# Altium schematic symbol library Lipo_discharger_new.SCHLIB: 12 symbols
Pins are listed as number, name and electrical type; pins without a type are passive.

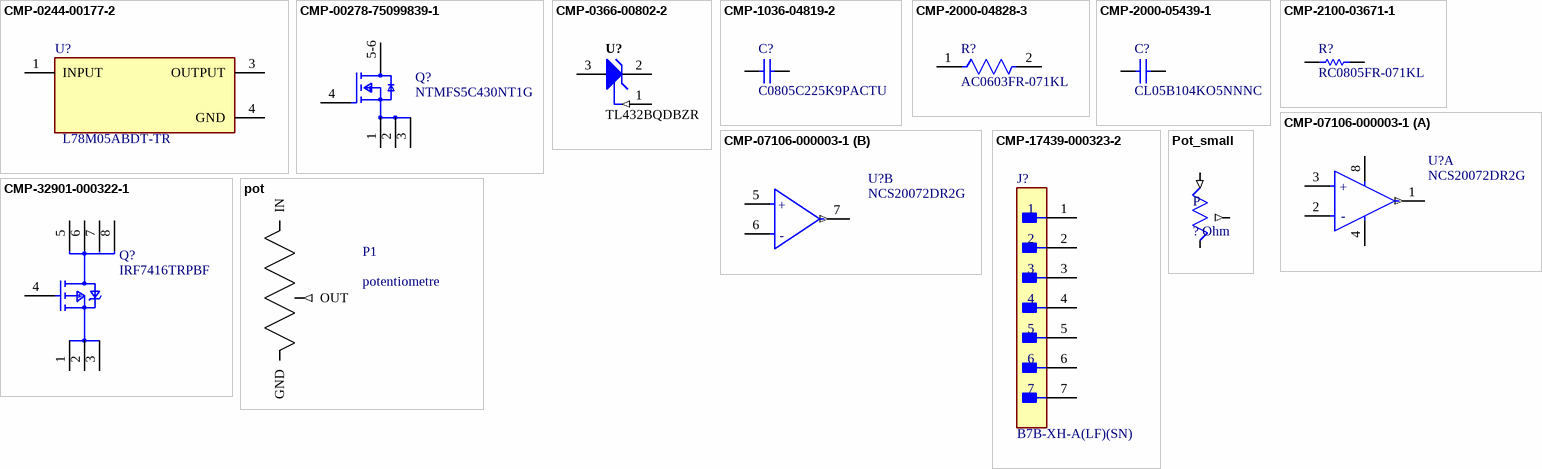
[diagram p0: symbols CMP-0244-00177-2 to Pot_small]

## CMP-0244-00177-2
designator U?, comment L78M05ABDT-TR
IC REG LINEAR 5V 500MA DPAK; Polarity: Positive; Accuracy: 2%; Max Input Voltage: 35V; Tolerance: 4%; Power Supply Rejection Ratio (PSRR): 62dB; Dropout Voltage: 2V; Output Type: Fixed; Number of Regulators: 1; Min Input Voltage: 10V; Quiescent Current: 6mA; Mount: Surface Mount; Min Operating Temperature: -40°C; Lead Free: Lead Free; Number of Pins: 3; Height: 2.4mm; Weight: 0.01lb; Width: 6.2mm; Packaging: Tape and Reel; Output Current: 500mA; Output Voltage: 5V; Case/Package: TO-252; REACH SVHC: No SVHC; Max Operating Temperature: 125°C; Nominal Output Voltage: 5V; Number of Outputs: 1; Min Output Voltage: 5V; Radiation Hardening: No; Length: 6.6mm; Max Output Current: 500mA; Contact Plating: Tin; Output Voltage Accuracy: 2%; Package Quantity: 1
footprint FP-L78M05ABDT-TR-MFG
pins: 1 INPUT (power), 3 OUTPUT (power), 4 GND (power)

## CMP-00278-75099839-1
designator Q?, comment NTMFS5C430NT1G
NTMFS5C430NT1G T6-D3F 40V Nfet/Reel Rohs Compliant: Yes; Manufacturer Lifecycle Status: ACTIVE; NexarPartId: 75099839; Drain to Source Resistance: 1.4mΩ; RoHS: Compliant; Lead Free: Lead Free; Schedule B: 8541290080, 8541290080; Lifecycle Status: Production
footprint FP-488AA-MFG (Single P-Channel Power MOSFET, -60 V, -100 A, 7.7 mΩ)
pins: 1 S, 2 S, 3 S, 4 G, 5-6 D

## CMP-0366-00802-2
designator U?, comment TL432BQDBZR
Adjustable Precision Shunt Regulator, 34 ppm / degC, 100 mA, -40 to 125 degC, 3-pin SOT-23 (DBZ), Green (RoHS & no Sb/Br); Manufacturer: Texas Instruments; VO Adj(Max)(V): 36; VO Adj(Min)(V): 2.495; Iout/Iz(Max)(mA): 100; Temp Coeff(Typ)(ppm/ degree C): 34; SubFamily: Shunt Voltage Reference; Initial Accuracy @ 25/deg C(%): 0.5; Rating: Catalog; Temp Coeff(Max)(ppm/ degree C): 92; Min Iz for Regulation(uA): 600; Mounting Technology: Surface Mount; DatasheetVersion: SLVS543M; ComponentLink3URL: http://www.ti.com/litv/pdf/mpds108a; Code_JEDEC: TO-236; ComponentLink3Description: Package Specification; ComponentLink1URL: http://www.ti.com/; PartNumber: TL432BQDBZR; Eco-Plan: Green (RoHS & no Sb/Br); PackageReference: DBZ0003A; ComponentLink2URL: http://www.ti.com/general/docs/lit/getliterature.tsp?genericPartNumber=TL432B&fileType=pdf; ComponentLink1Description: Manufacturer URL; PackageDescription: 3-Pin Plastic Small Outline, Body 2.92 x 1.3 mm, Pitch 0.95 mm; PackageVersion: 4203227/B; ComponentLink2Description: Datasheet
footprint DBZ0003A_N (SOT23, 3-Leads, Body 3.04x1.4mm, Pitch 0.95mm, IPC Medium Density)
footprint DBZ0003A_L (SOT23, 3-Leads, Body 3.04x1.4mm, Pitch 0.95mm, IPC High Density)
footprint DBZ0003A_M (SOT23, 3-Leads, Body 3.04x1.4mm, Pitch 0.95mm, IPC Low Density)
pins: 1 REF (in), 2 CATHODE, 3 ANODE

## CMP-1036-04819-2
designator C?, comment C0805C225K9PACTU
Manufacturer: Kemet; Part Number: C0805C225K9PACTU
footprint CAPC2013X145X50ML20T25 (Chip Capacitor, 2-Leads, Body 2.00x1.25mm, IPC Low Density)
footprint CAPC2013X145X50LL20T25 (Chip Capacitor, 2-Leads, Body 2.00x1.25mm, IPC High Density)
footprint CAPC2013X145X50NL20T25 (Chip Capacitor, 2-Leads, Body 2.00x1.25mm, IPC Medium Density)
pins: 1, 2
1 alternate drawing of the same symbol

## CMP-2000-04828-3
designator R?, comment AC0603FR-071KL
RES 1kΩ 1.00% 0.1W 0603; Voltage Rating: 50V; Power Rating: 100mW; Tolerance: 1%; Temperature Coefficient: 100ppm/°C; Resistance: 1kR; Depth: 0.8mm; Case/Package: 0603; Size Code: 0603; Case Code (Metric): 1608; Height: 0.022inch; Series: AC; Width: 0.031inch; Construction: Rectangular; Length: 0.063inch; Case Code (Imperial): 0603; Package Quantity: 1; RoHS Compliant: Yes; Features: Moisture Resistant; Resistor Type: Thick Film; Max Power Dissipation: 100mW; Packaging: Tape and Reel; Termination: SMD/SMT; Ratings: AEC-Q200; Max Operating Temperature: 155°C; Min Operating Temperature: -55°C; Military Standard: Not; Lead Free: Lead Free; Number of Terminations: 2
footprint FP-AC0603-IPC_B
footprint FP-AC0603-IPC_A
footprint FP-AC0603-MFG
footprint FP-AC0603-IPC_C
pins: 1, 2

## CMP-2000-05439-1
designator C?, comment CL05B104KO5NNNC
Chip Capacitor, 100 nF, +/- 10%, 16 V, -55 to 125 degC, 0402 (1005 Metric), RoHS, Tape and Reel; Manufacturer: Samsung Electro-Mechanics; Capacitance: 100000pF; Dielectric: X7R; Rated Voltage: 16V; Case Size/Dimension: 0402; Tolerance (%): ±10%; Manufacturer URL: http://www.samsungsem.com/global/index.jsp; Datasheet URL: https://datasheet.ciiva.com/29198/458718-da-01-en-vs-kondensator-0402-29198423.pdf; Datasheet Version: Nov-10
footprint CAPC1050X55X23ML05T13 (Chip Capacitor, 2-Leads, Body 1.05x0.55mm, IPC Low Density)
footprint CAPC1050X55X23NL05T13 (Chip Capacitor, 2-Leads, Body 1.05x0.55mm, IPC Medium Density)
footprint CAPC1050X55X23LL05T13 (Chip Capacitor, 2-Leads, Body 1.05x0.55mm, IPC High Density)
pins: 1, 2

## CMP-2100-03671-1
designator R?, comment RC0805FR-071KL
Chip Resistor, 1 KOhm, +/- 1%, 125 mW, -55 to 155 degC, 0805 (2012 Metric), RoHS, Tape and Reel; Manufacturer: Yageo; Temperature Coefficient: 100ppm/degreesC; Voltage Rating (DC): 150V; Max Power Dissipation: 125mW; Resistance: 1KOhm; Number of Pins: 2; Number of Terminations: 2; Datasheet URL: http://www.yageo.com/NewPortal/yageodocoutput?fileName=/pdf/R-Chip/PYu-RC_Group_51_RoHS_L_5.pdf; Length: 0.079inch; Package Description: 2-Pin Surface Mounted Device, Body 2 x 1.25 mm; Depth: 1.25mm; Height: 0.024inch; Military Standard: Not; Case/Package: 0805; Package Reference: 0805; RoHSCompliant: true; Lead Free: LeadFree; Packaging: TapeandReel; Package Quantity: 1; Datasheet Version: Rev. 5, 10/2016; Tolerance: 1%; Min Operating Temperature: -55degC; Voltage Rating: 150V; Composition: ThickFilm; Case Code (Imperial): 0805; Power Rating: 125mW; Width: 0.049inch; Case Code (Metric): 2012; Manufacturer URL: http://www.yageo.com/; Max Operating Temperature: 155degC; REACH SVHC: Unknown; Termination: SMD/SMT
footprint RESC2013X60X35ML10T20 (Chip Resistor, 2-Leads, Body 2.1x1.35mm, IPC Low Density)
footprint RESC2013X60X35NL10T20 (Chip Resistor, 2-Leads, Body 2.1x1.35mm, IPC Medium Density)
footprint RESC2013X60X35LL10T20 (Chip Resistor, 2-Leads, Body 2.00x1.25mm, IPC High Density)
pins: 1, 2

## CMP-07106-000003-1
designator U?, comment NCS20072DR2G
IC OPAMP 3MHZ RRO DUAL 8SOIC; Manufacturer: ON Semiconductor; Standoff Height: 0.1mm; Voltage Gain: 118-120dB; Max Junction Temp: +150°C; Min Supply Voltage: 2.7V; Max Dual Supply Voltage: 18V; Output Current Per Channel: 465uA; Input Bias Current: 0.000005uA; Input Offset Voltage: 1.3mV; Min Dual Supply Voltage: 1.35V; Max Supply Voltage: 36V; Nominal Supply Current: 405-465uA; Number Of Channels: 2; Gain Bandwidth: 3MHz; Temperature: -40°C to +125°C; Temperature Range High: +125°C; Ambient Temperature Range Low: -40°C; Device Class L1: Integrated Circuits (ICs); ComponentLink2Description: Datasheet; Package: 751-07; Lead Free: Yes; ComponentLink2URL: http://www.onsemi.com/pub/Collateral/NCS20071-D.PDF; Mouser Description: Operational Amplifiers - Op Amps R2R DUAL AMPLIFIER; Manufacturer Part Number: NCS20072DR2G; Octopart: https://octopart.com/ncs20072dr2g-on+semiconductor-56676507; Automotive: No; Device Class L3: Amplifiers - Op Amps; Device Class L2: Linear ICs; Category: IC; Bandwidth: 3MHz; Footprint Url: http://www.onsemi.com/pub/Collateral/751-07.PDF; RoHS: TRUE; Temperature Range Low: -40°C; Ambient Temperature Range High: +125°C; Height: 1.75mm; Digikey Description: IC OPAMP 3MHZ RRO DUAL 8SOIC
footprint FP-751-07-MFG
footprint FP-751-07-IPC_C
footprint FP-751-07-IPC_B
footprint FP-751-07-IPC_A
part A pins: 1 OUT 1 (out), 2 IN- 1 (hiz), 3 IN+ 1 (hiz), 4 VSS (power), 8 VDD (power)
part B pins: 5 IN+ 2 (hiz), 6 IN- 2 (hiz), 7 OUT 2 (out)
part A text: +; -
part B text: +; -

## CMP-17439-000323-2
designator J?, comment B7B-XH-A(LF)(SN)
CONN HEADER VERT 7POS 2.5MM; Current Rating: 3A; Voltage Rating: 250V; Number of Contacts: 7; Mated Stacking Heights: 9.8mm; Insulation Resistance: 1GR; Contact Resistance: 20mR; Wire/Cable Gauge: 22AWG; Contact Finish - Mating: TIN; Orientation: Straight; REACH SVHC: No SVHC; Max Operating Temperature: 85°C; Housing Color: White; Pitch: 2.5mm; Mount: Through Hole; Packaging: Bulk; Depth: 5.75mm; Series: XH; Min Operating Temperature: -25°C; Length: 19.9mm; Connector Type: Header; Number of Positions: 7; Color: Natural; Max Current Rating: 3A; Lead Pitch: 2.5mm; Termination: Solder; Fastening Type: Detent; Flammability Rating: UL94 V-0; Voltage Rating (AC): 250V; Lead Free: Lead Free; Contact Material: Brass; Max Voltage Rating (AC): 250V; Contact Type: Male Pin; Housing Material: Polyamide; Insulation Color: Natural; Contact Shape: Square; Number of Rows: 1; Contact Plating: Tin; Insulation Material: Nylon
footprint FP-B7B-XH-A_LF_SN-MFG
pins: 1, 2, 3, 4, 5, 6, 7

## CMP-32901-000322-1
designator Q?, comment IRF7416TRPBF
MOSFET P-CH 30V 10A 8-SOIC; Max Dual Supply Voltage: -30V; Input Capacitance: 1.7nF; Max Power Dissipation: 2.5W; Turn-Off Delay Time: 59ns; Threshold Voltage: -20V; Rise Time: 49ns; Drain to Source Resistance: 35mR; Rds On Max: 20mR; Turn-On Delay Time: 18ns; Gate to Source Voltage (Vgs): 20V; Continuous Drain Current (ID): 10A; Length: 0.196inch; Packaging: Tape and Reel; Max Operating Temperature: 150°C; Case/Package: SO; Drain to Source Breakdown Voltage: -30V; Halogen Free: Halogen Free; Mount: Surface Mount; Contact Plating: Tin; Number of Pins: 8; Height: 0.059inch; Lead Free: Lead Free; Min Operating Temperature: -55°C; REACH SVHC: No SVHC; Width: 0.157inch; Power Dissipation: 2.5W; Drain to Source Voltage (Vdss): -30V; RoHS Compliant: Yes
footprint FP-PG-DSO-8-IPC_B
footprint FP-PG-DSO-8-MFG
footprint FP-PG-DSO-8-IPC_A
footprint FP-PG-DSO-8-IPC_C
pins: 1 S, 2 S, 3 S, 4 G, 5 D, 6 D, 7 D, 8 D

## pot
designator P1, comment potentiometre
footprint pot (Footprint not found)
pins: 0 IN, 1 GND, 2 OUT (out)

## Pot_small
designator P, comment ? Ohm
footprint Pot_new
pins: 0 IN (in), 1 GND (power), 2 OUT (out)